# Altium footprint library DS_PcbLib.PcbLib: 44 footprints (part 3 of 3)
Each footprint in its own frame and in the unit in brackets; x right, y up, seen from the top. Pads: shape width x height; smd on the part's side, far side on the other; paste and mask are expansions set on the pad; w line width, h text height; cw(c..) or ccw(c..) is an arc to the next point about the centre after c.
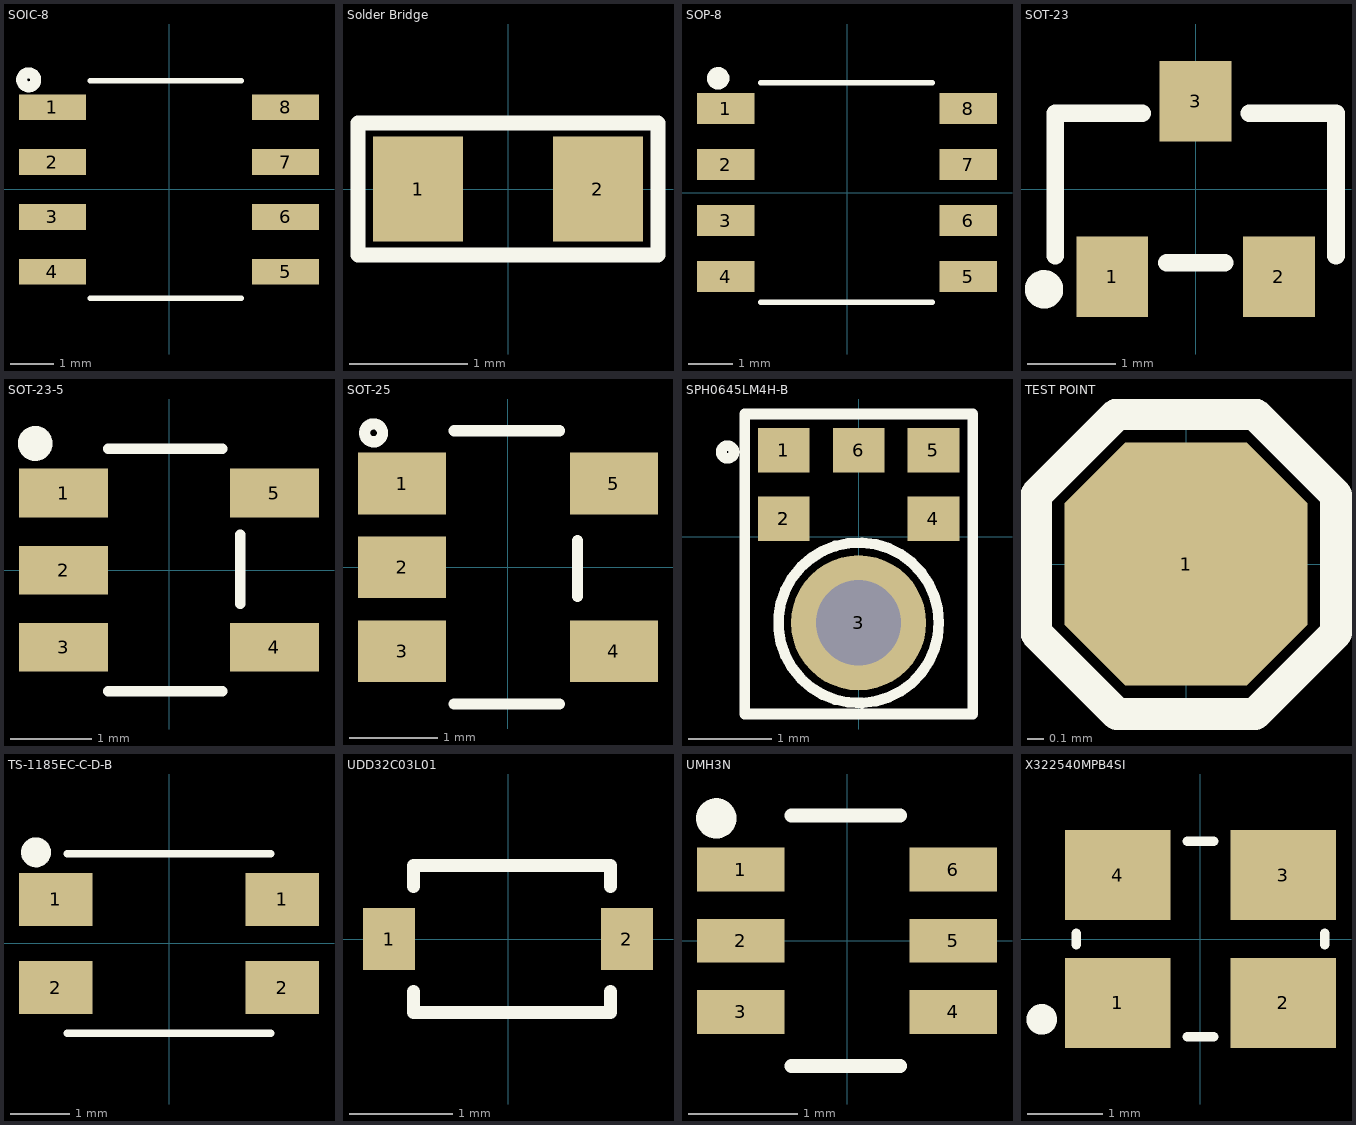
[diagram p2: the footprints below, top view; thin cyan lines are the x and y axes]

## SOIC-8 [mm]
pads (8):
  rect 1.55x0.6 smd: 1(-2.7,1.905) 2(-2.7,0.635) 3(-2.7,-0.635) 4(-2.7,-1.905) 5(2.7,-1.905) 6(2.7,-0.635) 7(2.7,0.635) 8(2.7,1.905)
Top Overlay:
  circle w0.254: c-3.251,2.54 r0.163
  lines w0.127: -1.829,-2.515 1.676,-2.515 ; -1.829,2.515 1.676,2.515
3D body "User Library-SOIC-8-1.STEP": height 1.7, standoff -0.05, extent -3,-2.45 3,2.45

## Solder Bridge [mil] "Solder Bridge ON"
pads (2):
  rect 30x35 smd: 1(-30,0) 2(30,0)
Top Overlay:
  lines w5: -50,-22 50,-22 50,22 -50,22 -50,-22

## SOP-8 [mm]
pads (8):
  rect 1.3x0.7 smd: 1(-2.75,1.905) 2(-2.75,0.635) 3(-2.75,-0.635) 4(-2.75,-1.905) 5(2.75,-1.905) 6(2.75,-0.635) 7(2.75,0.635) 8(2.75,1.905)
Top Overlay:
  circle w0.254: c-2.921,2.591 r0.127
  lines w0.127: -1.956,-2.489 1.93,-2.489 ; -1.956,2.489 1.93,2.489
3D body "User Library-SOIC-8-1.STEP": height 1.7, standoff -0.05, extent -3.025,-2.475 2.975,2.425

## SOT-23 [mm] "TRANS NPN 40V 0.6A SOT23"
pads (3):
  rect 0.82x0.92 smd: 1(-0.95,-1) 2(0.95,-1) 3(0,1)
Top Overlay:
  circle w0.254: c-1.727,-1.143 r0.092
  lines w0.2: -1.6,-0.762 -1.6,0.864 -0.61,0.864 ; -0.33,-0.838 0.33,-0.838 ; 0.61,0.864 1.6,0.864 1.6,-0.762
3D body "CircuitWorks-SOT-23.step": height 1.05, standoff -0.05, extent -1.5,-1.25 1.5,1.25

## SOT-23-5 [mm]
pads (5):
  rect 1.1x0.6 smd: 1(-1.3,0.95) 2(-1.3,0) 3(-1.3,-0.95) 4(1.3,-0.95) 5(1.3,0.95)
Top Overlay:
  circle w0.254: c-1.65,1.562 r0.088
  lines w0.127: -0.748,-1.496 0.66,-1.496 ; -0.748,1.496 0.66,1.496 ; 0.88,-0.418 0.88,0.44
3D body "SN74LV1T34DBVR.STEP": height 1.45, standoff 0, extent -1.4,-1.45 1.4,1.45

## SOT-25 [mm]
pads (5):
  rect 1x0.7 smd: 1(-1.2,0.95) 2(-1.2,0) 3(-1.2,-0.95) 4(1.2,-0.95) 5(1.2,0.95)
Top Overlay:
  circle w0.127: c-1.524,1.524 r0.102
  lines w0.127: -0.61,-1.549 0.584,-1.549 ; -0.61,1.549 0.584,1.549 ; 0.787,-0.33 0.787,0.305
3D body "User Library-sot25.step": height 1.1, standoff -0.05, extent -1.206,-1.5 1.194,1.5

## SPH0645LM4H-B [mm] "MEMS Microphones DIG MEMs Mic, BP w/ I2S output"
pads (7):
  rect 0.62x0.532 smd: 1(-0.9,1.037) 2(-0.9,0.215) 2(-0.9,0.215) 4(0.9,0.215) 5(0.9,1.037) 6(0,1.037)
  round 1.624 hole 1.024: 3(0,-1.037)
Top Overlay:
  circle w0.127: c-1.575,1.016 r0.076
  circle w0.127: c0,-1.037 r0.965
  lines w0.127: -1.372,-2.134 -1.372,1.473 1.372,1.473 1.372,-2.134 -1.372,-2.134
3D body "SPH0645LM4H-B--3DModel-STEP-56544.STEP": height 1.07, standoff -0.01, extent -1.325,-2.08 1.325,1.42

## TEST POINT [mil]
pads (1):
  oct 60x60 smd: 1(0,0)
Top Overlay:
  lines w7.87: -17,-37 17,-37 ; -17,-37 -37,-17 -37,17 -17,37 ; -17,-37 17,-37 ; -17,37 17,37 ; -17,37 17,37 ; 17,-37 37,-17 37,17 17,37

## TS-1185EC-C-D-B [mm]
pads (4):
  rect 1.25x0.9 smd: 1(-1.925,0.75) 1(1.925,0.75) 2(-1.925,-0.75) 2(1.925,-0.75)
Top Overlay:
  circle w0.254: c-2.261,1.549 r0.127
  lines w0.127: -1.727,-1.524 1.727,-1.524 ; -1.727,1.524 1.727,1.524
3D body "ts-1185ec-c-d-b.stp": height 2, standoff 0, extent -2.325,-1.5 2.325,1.5

## UDD32C03L01 [mm]
pads (2):
  rect 0.5x0.6 smd: 1(-1.15,0) 2(1.15,0)
Top Overlay:
  lines w0.127: -0.914,-0.508 -0.914,-0.711 0.991,-0.711 0.991,-0.508 ; -0.914,0.508 -0.914,0.711 0.991,0.711 0.991,0.508
3D body "User Library-SOD323-1.STEP": height 1.1, standoff 0, extent -1.3,-0.675 1.3,0.675

## UMH3N [mm]
pads (6):
  rect 0.8x0.4 smd: 1(-0.97,0.65) 2(-0.97,0) 3(-0.97,-0.65) 4(0.97,-0.65) 5(0.97,0) 6(0.97,0.65)
Top Overlay:
  circle w0.254: c-1.194,1.118 r0.057
  lines w0.127: -0.508,-1.143 0.483,-1.143 ; -0.508,1.143 0.483,1.143
3D body "User Library-SOT363-2.STEP": height 1.08, standoff -0.02, extent -1.2,-1.1 1.2,1.1

## X322540MPB4SI [mm]
pads (4):
  rect 1.4x1.2 smd: 1(-1.1,-0.85) 2(1.1,-0.85) 3(1.1,0.85) 4(-1.1,0.85)
Top Overlay:
  circle w0.254: c-2.108,-1.067 r0.076
  lines w0.127: -1.651,-0.076 -1.651,0.076 ; -0.178,-1.295 0.178,-1.295 ; -0.178,1.295 0.178,1.295 ; 1.651,-0.076 1.651,0.076
3D body "ABM8-24.000MHZ-R60-D-1-W-T.STEP": height 0.8, standoff 0, extent -1.6,-1.25 1.6,1.25